# EAGLE library part TPS48111LQDGXRQ1 (library TPS48111LQDGXRQ1)
TPS4811-Q1 100V Automotive Smart High-Side Driver With Protection and Diagnostics , 3.5V ~ 80V , 4A , 19-VSSOP ,-40C ~ 125C (TA) Source: Datasheet <https://www.ti.com/lit/gpn/tps4811-q1>
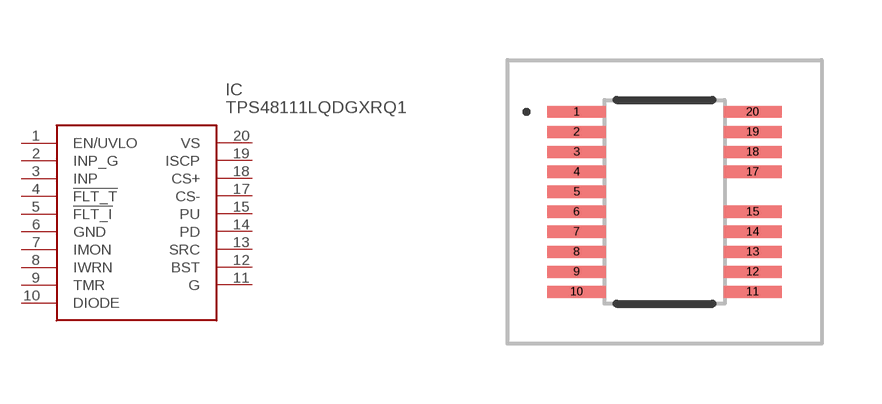
[diagram p0: symbol with the pads of TPS48111LQDGXRQ1; footprint TPS48111LQDGXRQ1]

Designator prefix IC

## TPS48111LQDGXRQ1 (Arrow_Part_Number: TPS48111LQDGXRQ1; Arrow_Price-Stock: https://www.arrow.com/en/products/tps48111lqdgxrq1/texas-instruments.html?utm_currency=USD&region=nac; Description: TPS4811-Q1 100V Automotive Smart High-Side Driver With Protection and Diagnostics , 3.5V ~ 80V , 4A , 19-VSSOP ,-40C ~ 125C (TA); Height: 1.1mm; Manufacturer_Name: Texas Instruments; Manufacturer_Part_Number: TPS48111LQDGXRQ1; Mouser_Part_Number: 595-TPS48111LQDGXRQ1; Mouser_Price-Stock: https://www.mouser.co.uk/ProductDetail/Texas-Instruments/TPS48111LQDGXRQ1?qs=amGC7iS6iy%2Faisrr5sZ5WQ%3D%3D)  [TPS48111LQDGXRQ1]
1  EN/UVLO
2  INP_G
3  INP
4  !FLT_T
5  !FLT_I
6  GND
7  IMON
8  IWRN
9  TMR
10  DIODE
11  G
12  BST
13  SRC
14  PD
15  PU
17  CS-
18  CS+
19  ISCP
20  VS

## Footprint TPS48111LQDGXRQ1 (pad centres in mm)
DGX0019A_2025-20
smd 1.45 x 0.3: 1 -2.2,2.25; 2 -2.2,1.75; 3 -2.2,1.25; 4 -2.2,0.75; 5 -2.2,0.25; 6 -2.2,-0.25; 7 -2.2,-0.75; 8 -2.2,-1.25; 9 -2.2,-1.75; 10 -2.2,-2.25; 11 2.2,-2.25; 12 2.2,-1.75; 13 2.2,-1.25; 14 2.2,-0.75; 15 2.2,-0.25; 17 2.2,0.75; 18 2.2,1.25; 19 2.2,1.75; 20 2.2,2.25